# Altium footprint library 2S-Li-ion-Charger.PcbLib: 13 footprints
Each footprint in its own frame and in the unit in brackets; x right, y up, seen from the top. Pads: shape width x height; smd on the part's side, far side on the other; paste and mask are expansions set on the pad; w line width, h text height; cw(c..) or ccw(c..) is an arc to the next point about the centre after c.
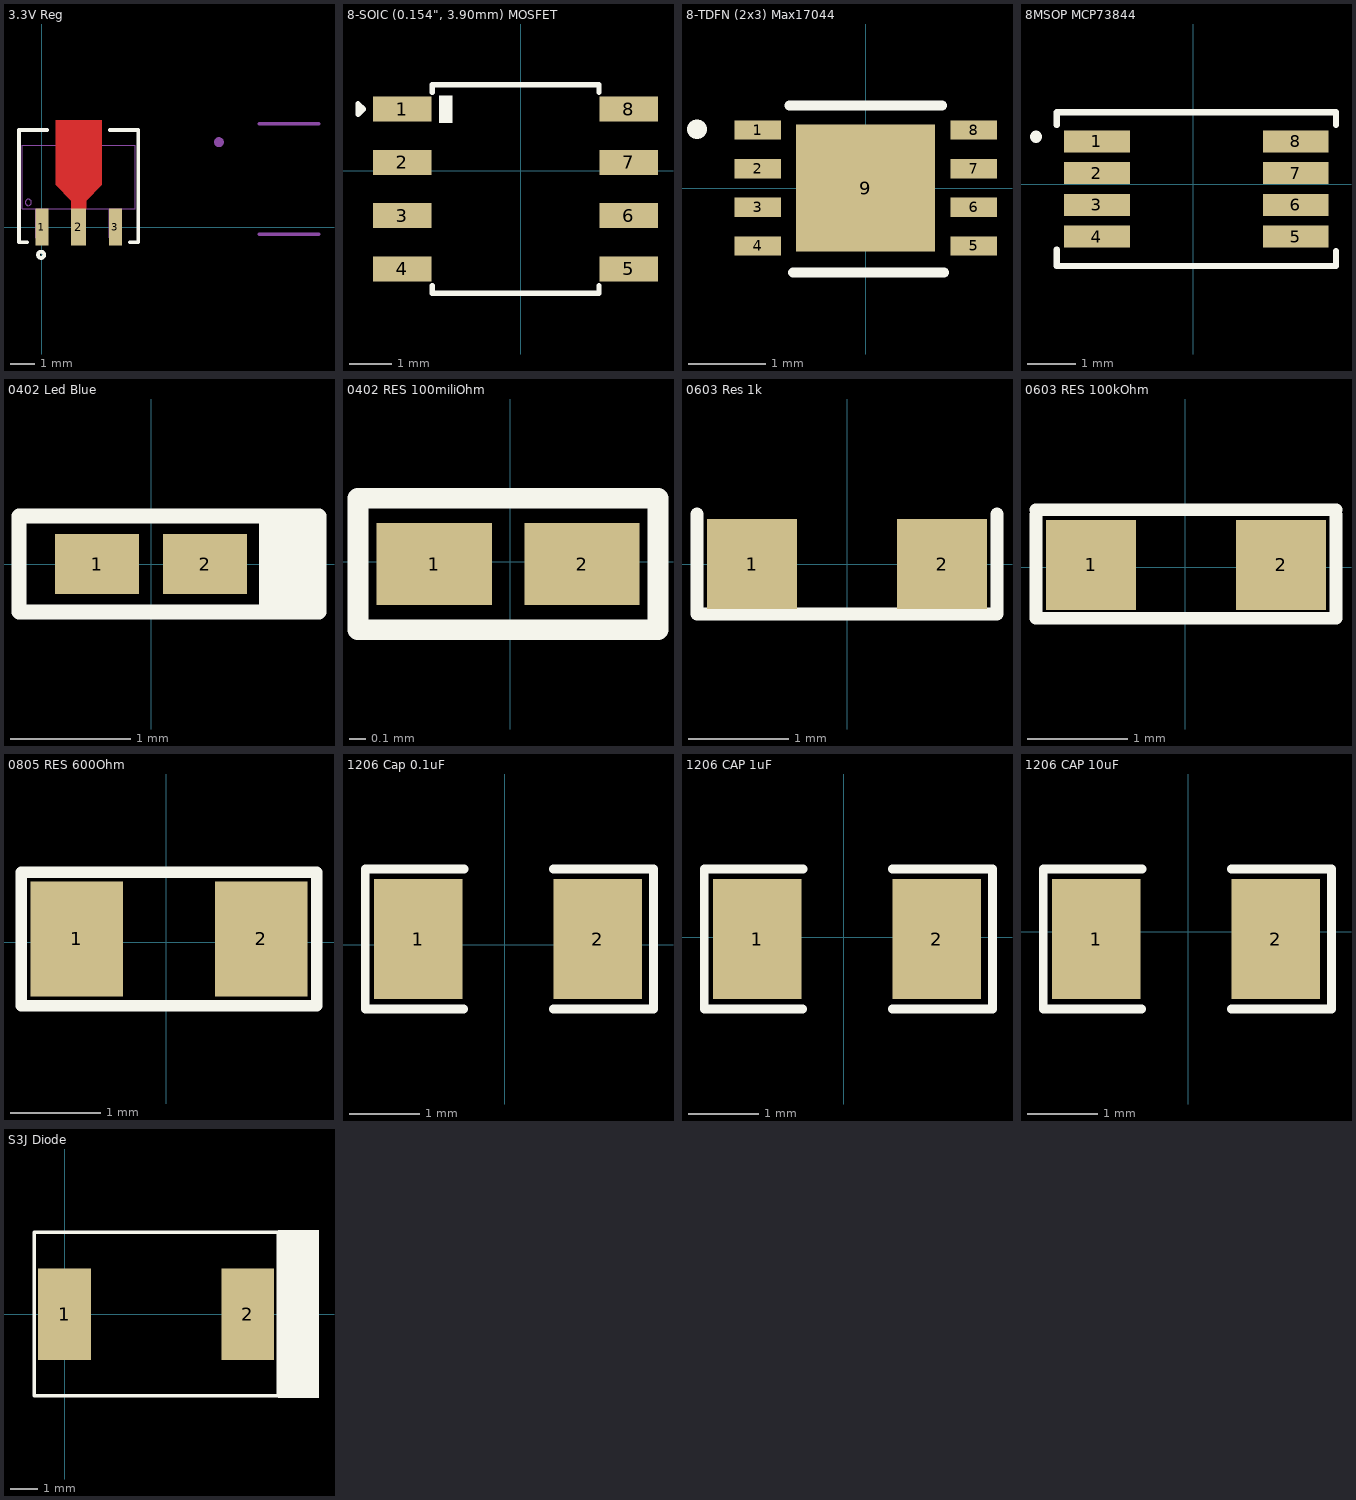
[diagram p0: the footprints below, top view; thin cyan lines are the x and y axes]

## 3.3V Reg [mil] "L78L33ACUTR"
pads (3):
  rect 21x59 smd paste+0: 1(0,0) 3(117.72,0)
  rect 24x59 smd paste+0: 2(58.86,0)
Top Layer:
  region: 70.86,29.5 46.86,29.5 46.86,42.5 21.86,67.5 21.86,171.5 95.86,171.5 95.86,67.5 70.86,42.5
Top Overlay:
  circle w6: c-1.14,-44.5 r5
  lines w6: -23.6,-24.5 -36.64,-24.5 -36.64,155.5 8.76,155.5 ; 108.96,155.5 154.36,155.5 154.36,-24.5 141.32,-24.5
Top Paste:
  region: 70.86,28.5 46.86,28.5 46.86,42.5 21.86,67.5 21.86,161.5 95.86,161.5 95.86,67.5 70.86,42.5
Top Solder:
  region: 70.86,28.5 46.86,28.5 46.86,42.5 21.86,67.5 21.86,161.5 95.86,161.5 95.86,67.5 70.86,42.5
Mechanical 13:
  circle w7.87: c283.78,136.09 r3.94
  circle w0: c-21.64,39.5 r5
  lines w1: -31.64,29.5 -31.64,131.5 149.36,131.5 149.36,29.5 -31.64,29.5 ; -9.5,-17.5 9.5,-17.5 9.5,29.5 -9.5,29.5 -9.5,-17.5 ; 47.86,-17.5 69.86,-17.5 69.86,29.5 47.86,29.5 47.86,-17.5 ; 108.22,-17.5 127.22,-17.5 127.22,29.5 108.22,29.5 108.22,-17.5
  lines w5: 347.85,-11.55 444.11,-11.55 ; 347.85,165.62 444.11,165.62
3D body "SOT-89_STM.step": height 65.12, standoff 0, extent -31.65,-17.49 149.37,149.52

## 8-SOIC (0.154", 3.90mm) MOSFET [mm] "STS5P3LLH6"
pads (8):
  rect 1.4x0.6 smd: 1(-2.825,1.473) 2(-2.825,0.203) 3(-2.825,-1.067) 4(-2.825,-2.337) 5(2.575,-2.337) 6(2.575,-1.067) 7(2.575,0.203) 8(2.575,1.473)
Top Overlay:
  rectangle: -1.953,1.142 -1.623,1.803
  lines w0.127: -2.115,-2.744 -2.115,-2.922 1.866,-2.922 1.866,-2.744 ; -2.115,1.879 -2.115,2.057 1.866,2.057 1.866,1.879 ; -3.884,1.346 -3.757,1.473 -3.884,1.6 -3.884,1.346
3D body "User Library-SOIC-8-1.STEP": height 1.7, standoff -0.05, extent -3.124,-2.882 2.876,2.018

## 8-TDFN (2x3) Max17044 [mm]
pads (9):
  rect 0.6x0.25 smd: 1(-1.4,0.75) 2(-1.4,0.25) 3(-1.4,-0.25) 4(-1.4,-0.75) 5(1.4,-0.75) 6(1.4,-0.25) 7(1.4,0.25) 8(1.4,0.75)
  rect 1.8x1.65 smd: 9(0,0)
Top Overlay:
  lines w0.127: -0.991,1.067 0.991,1.067 ; -0.94,-1.092 1.016,-1.092
  lines w0.254: -2.184,0.762 -2.184,0.762
3D body "21-0174_T8231_MXM.step": height 0.81, standoff 0, extent -1.524,-1.029 1.524,1.029

## 8MSOP MCP73844 [mm]
pads (8):
  rect 1.35x0.45 smd: 1(-1.975,0.877) 2(-1.975,0.227) 3(-1.975,-0.423) 4(-1.975,-1.073) 5(2.1,-1.073) 6(2.1,-0.423) 7(2.1,0.227) 8(2.1,0.877)
Top Overlay:
  lines w0.127: -2.8,-1.34 -2.8,-1.675 2.925,-1.675 2.925,-1.372 ; -2.8,1.213 -2.8,1.477 -1.369,1.477 1.494,1.477 2.925,1.477 2.925,1.219
  lines w0.254: -3.225,0.975 -3.225,0.975
3D body "MSOP8_MC_MCH.step": height 1.1, standoff 0, extent -2.45,-1.6 2.45,1.4

## 0402 Led Blue [mm] "APHHS1005QBC/D"
pads (2):
  rect 0.7x0.5 smd: 1(-0.45,0) 2(0.45,0)
Top Overlay:
  rectangle: 0.9,-0.4 1.4,0.4
  lines w0.127: -1.1,-0.4 1.4,-0.4 1.4,0.4 -1.1,0.4 -1.1,-0.4
3D body "LED_SMD_1XP5_KNB.step": height 0.51, standoff 0, extent -0.495,-0.254 0.495,0.254

## 0402 RES 100miliOhm [mm] "PE0402FRF470R1L"
pads (2):
  rect 0.7x0.5 smd: 1(-0.461,-0.014) 2(0.439,-0.014)
Top Overlay:
  lines w0.127: -0.925,-0.414 0.9,-0.414 0.9,0.386 -0.925,0.386 -0.925,-0.414
3D body "PE0402FRF470R1L.STEP": height 0.5, standoff 0, extent -0.5,-0.425 0.5,0.075

## 0603 Res 1k [mm] "RT0603FRE071KL"
pads (2):
  rect 0.9x0.9 smd: 1(-0.95,0) 2(0.95,0)
Top Overlay:
  lines w0.127: -1.5,0.5 -1.5,-0.5 1.5,-0.5 1.5,0.5
3D body "RC0603N_YAG.step": height 0.71, standoff 0, extent -0.8,-0.406 0.8,0.406

## 0603 RES 100kOhm [mm] "RT0603WRE07100KL"
pads (2):
  rect 0.9x0.9 smd: 1(-0.942,0.027) 2(0.958,0.027)
Top Overlay:
  lines w0.127: -1.492,0.527 -1.492,-0.508 1.508,-0.508 1.508,0.527 ; -1.492,0.577 1.508,0.577
3D body "RC0603N_YAG.step": height 0.71, standoff 0, extent -0.792,-0.379 0.808,0.433

## 0805 RES 600Ohm [mil] "CRCW0805600RFKEAHP"
pads (2):
  rect 40x50 smd: 1(-38.84,1.41) 2(41.16,1.41)
Top Overlay:
  lines w5: -62.84,-27.59 -62.84,30.41 65.16,30.41 65.16,-27.59 -62.84,-27.59
3D body "User Library-CR2012-0805.STEP": height 23.62, standoff 0, extent -38.18,-23.34 40.56,25.87

## 1206 Cap 0.1uF [mm] "T491A104K035AT"
pads (2):
  rect 1.25x1.7 smd: 1(-1.227,0.078) 2(1.313,0.078)
Top Overlay:
  lines w0.127: -0.584,-0.913 -1.975,-0.913 -1.975,1.069 -0.582,1.069 ; 0.684,1.069 2.1,1.069 2.1,-0.913 0.688,-0.913
3D body "User Library-1206 SMD Capacitor.step": height 1, standoff 0, extent -1.557,-0.721 1.643,0.879

## 1206 CAP 1uF [mm] "T491A105K050AT"
pads (2):
  rect 1.25x1.7 smd: 1(-1.227,-0.024) 2(1.313,-0.024)
Top Overlay:
  lines w0.127: -0.584,-1.014 -1.975,-1.014 -1.975,0.967 -0.582,0.967 ; 0.684,0.967 2.1,0.967 2.1,-1.014 0.688,-1.014
3D body "User Library-1206 SMD Capacitor.step": height 1, standoff 0, extent -1.557,-0.823 1.643,0.777

## 1206 CAP 10uF [mm] "T491A106K010AT"
pads (2):
  rect 1.25x1.7 smd: 1(-1.304,-0.1) 2(1.236,-0.1)
Top Overlay:
  lines w0.127: -0.66,-1.09 -2.051,-1.09 -2.051,0.891 -0.659,0.891 ; 0.608,0.891 2.024,0.891 2.024,-1.09 0.611,-1.09
3D body "User Library-1206 SMD Capacitor.step": height 1, standoff 0, extent -1.633,-0.899 1.567,0.701

## S3J Diode [mm]
pads (2):
  rect 1.96x3.39 smd: 1(0,0) 2(6.8,0)
Top Overlay:
  rectangle: 7.925,-3.099 9.449,3.124
  lines w0.127: -1.125,-3.025 7.925,-3.025 7.925,3.05 -1.125,3.05 -1.125,-3.025
  lines w0.254: 8.475,1 8.5,1 8.488,1
3D body "SMC.step": height 2.27, standoff 0, extent -0.57,-2.953 7.37,2.953